# Altium footprint library exb6202.PcbLib: 1 footprints
Each footprint in its own frame and in the unit in brackets; x right, y up, seen from the top. Pads: shape width x height; smd on the part's side, far side on the other; paste and mask are expansions set on the pad; w line width, h text height; cw(c..) or ccw(c..) is an arc to the next point about the centre after c.
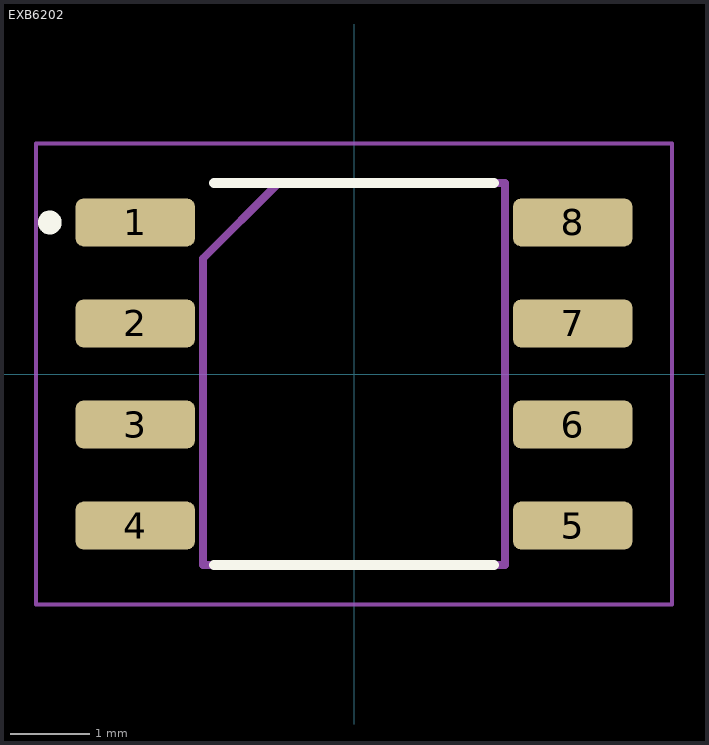
[diagram p0: the footprint, top view; thin cyan lines are the x and y axes]

## EXB6202 [mm] "SPDX-License-Identifier: CC0-1.0; Authored for Fenolite; https://example.invalid/exb6202. gullwing/1 manufacturer drawing/1; land: manufacturer Fenolite-authored fictional land"
pads (8):
  rrect33% 1.5x0.6 smd: 1(-2.75,1.905) 2(-2.75,0.635) 3(-2.75,-0.635) 4(-2.75,-1.905) 5(2.75,-1.905) 6(2.75,-0.635) 7(2.75,0.635) 8(2.75,1.905)
Top Overlay:
  circle w0.15: c-3.825,1.905 r0.075
  lines w0.125: -1.763,-2.4 1.763,-2.4 ; -1.763,2.4 1.763,2.4
Mechanical 13:
  lines w0.1: -1.9,-2.4 1.9,-2.4 1.9,2.4 -0.95,2.4 -1.9,1.45 -1.9,-2.4
Mechanical 15:
  lines w0.05: -4,-2.9 4,-2.9 4,2.9 -4,2.9 -4,-2.9